# Altium footprint library ESDBW5V0A1_C5173252.PcbLib: 1 footprints
Each footprint in its own frame and in the unit in brackets; x right, y up, seen from the top. Pads: shape width x height; smd on the part's side, far side on the other; paste and mask are expansions set on the pad; w line width, h text height; cw(c..) or ccw(c..) is an arc to the next point about the centre after c.
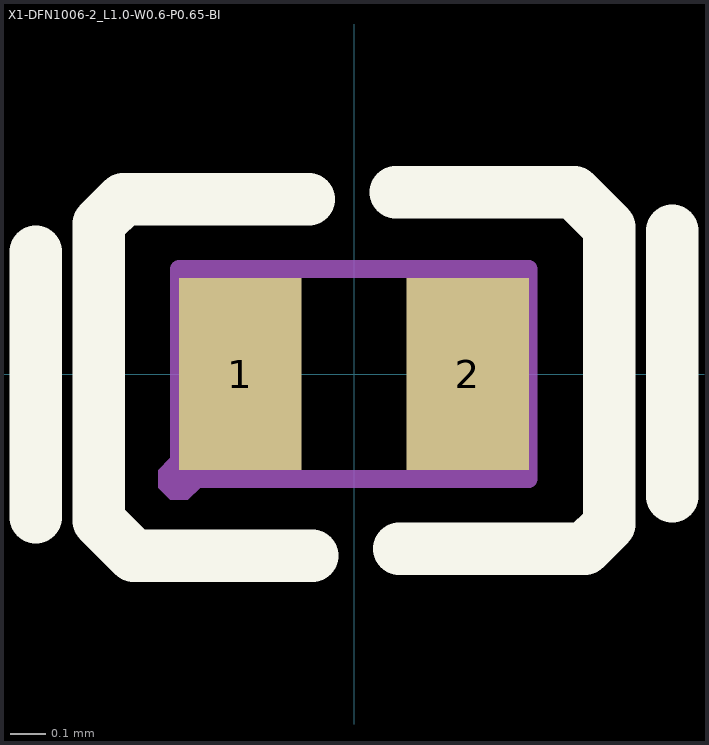
[diagram p0: the footprint, top view; thin cyan lines are the x and y axes]

## X1-DFN1006-2_L1.0-W0.6-P0.65-BI [mm]
pads (2):
  rect 0.35x0.55 smd: 1(-0.325,0) 2(0.325,0)
Top Overlay:
  lines w0.15: -0.91,-0.41 -0.91,0.35 ; -0.13,0.5 -0.66,0.5 -0.73,0.43 -0.73,0.32 -0.73,-0.42 -0.63,-0.52 -0.6,-0.52 -0.12,-0.52 ; 0.12,0.52 0.6,0.52 0.63,0.52 0.73,0.42 0.73,-0.32 0.73,-0.43 0.66,-0.5 0.13,-0.5 ; 0.91,-0.35 0.91,0.41
Mechanical 6:
  lines w0.051: -0.5,-0.3 -0.5,0.3 0.5,0.3 0.5,-0.3 -0.5,-0.3
Mechanical 8:
  region: -0.44,-0.3 -0.44,-0.325 -0.475,-0.36 -0.525,-0.36 -0.56,-0.325 -0.56,-0.3 -0.56,-0.275 -0.525,-0.24 -0.475,-0.24 -0.44,-0.275 -0.44,-0.3
Mechanical 9:
  region: -0.2,-0.25 -0.45,-0.25 -0.45,0.25 -0.2,0.25
  region: 0.2,0.25 0.45,0.25 0.45,-0.25 0.2,-0.25